# Altium footprint library INF-PG-TO247-3.PcbLib: 1 footprints
Each footprint in its own frame and in the unit in brackets; x right, y up, seen from the top. Pads: shape width x height; smd on the part's side, far side on the other; paste and mask are expansions set on the pad; w line width, h text height; cw(c..) or ccw(c..) is an arc to the next point about the centre after c.
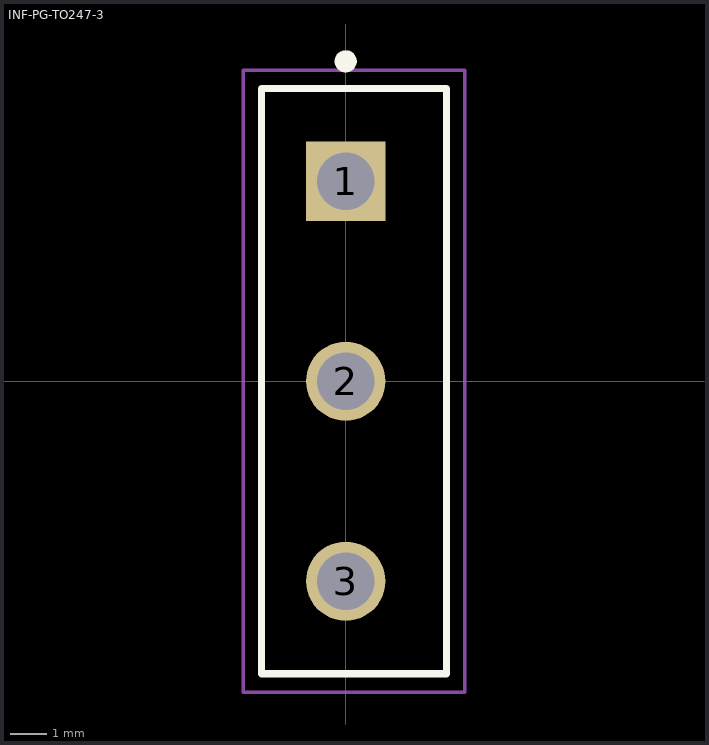
[diagram p0: the footprint, top view; thin cyan lines are the x and y axes]

## INF-PG-TO247-3 [mm] "TO-247-3,5.44mm pitch;3 pin,15.915mm L X 5.02mm W X 25.57mm H body"
height 25.57
pads (3):
  rect 2.16x2.16 hole 1.56 paste+0 mask+0: 1(0,5.44)
  round 2.16 hole 1.56 paste+0 mask+0: 2(0,0) 3(0,-5.44)
Top Overlay:
  circle w0.3: c0,8.7 r0.15
  lines w0.2: -2.29,-7.96 2.74,-7.96 2.74,7.96 -2.29,7.96 -2.29,-7.96
Mechanical 3:
  text ".DESIGNATOR" at 0,0 h1.2
Mechanical 13:
  lines w0.1: -2.287,-7.957 -2.287,7.957 2.733,7.957 2.733,-7.957 -2.287,-7.957
Mechanical 15:
  lines w0.1: -0.5,0 0.5,0 ; 0,-0.5 0,0.5 ; -2.79,-8.46 -2.79,8.46 3.24,8.46 3.24,-8.46 -2.79,-8.46
3D body: height 25.23, standoff -15.78, extent -2.384,-7.957 2.836,7.958
3D body: height 0, standoff -18.14, extent -0.34,4.825 0.34,6.095
3D body: height 0, standoff -18.14, extent -0.34,-6.095 0.34,-4.825
3D body: height 0, standoff -18.14, extent -0.34,-0.635 0.34,0.635